# Altium footprint library FootPrintLib_10.PcbLib: 270 footprints (part 1 of 17)
Each footprint in its own frame and in the unit in brackets; x right, y up, seen from the top. Pads: shape width x height; smd on the part's side, far side on the other; paste and mask are expansions set on the pad; w line width, h text height; cw(c..) or ccw(c..) is an arc to the next point about the centre after c.
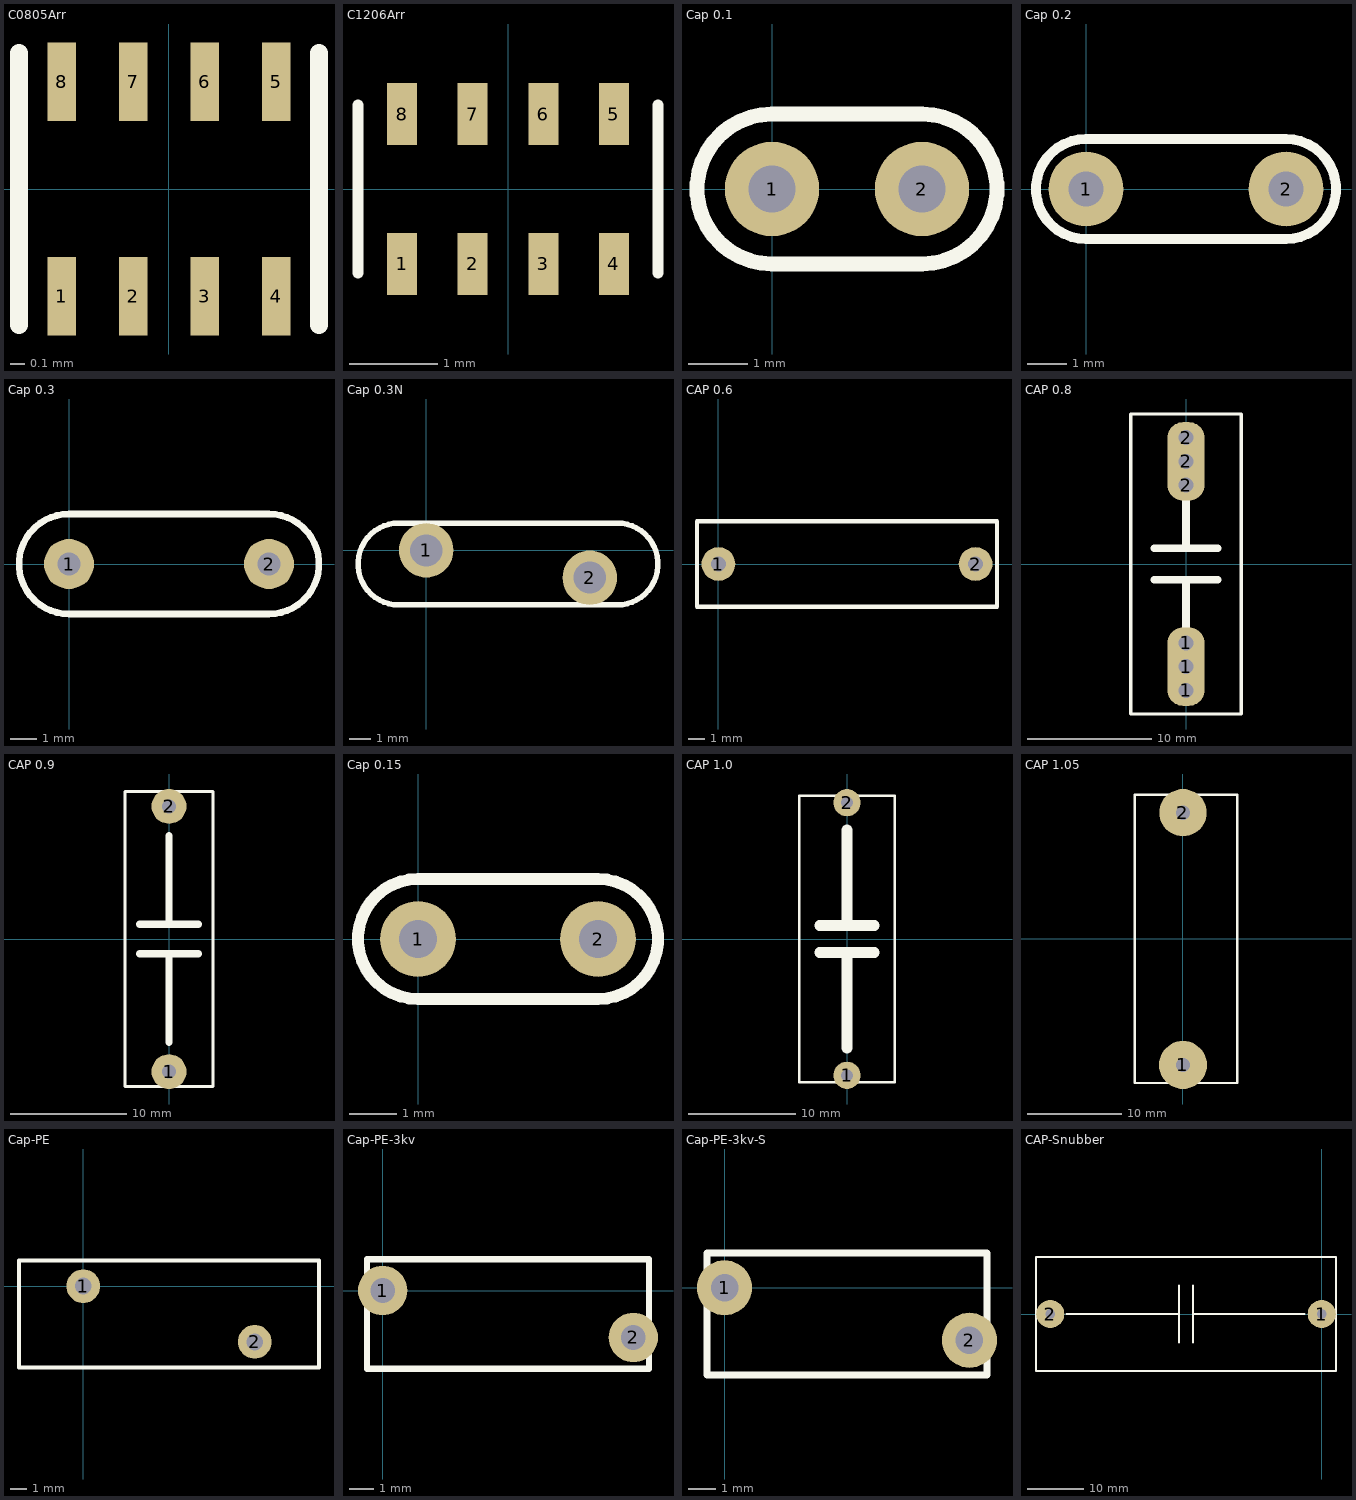
[diagram p0: the footprints below, top view; thin cyan lines are the x and y axes]

## C0805Arr [mm]
pads (8):
  rect 0.2x0.55 smd: 1(-0.75,-0.75) 2(-0.25,-0.75) 3(0.25,-0.75) 4(0.75,-0.75) 5(0.75,0.75) 6(0.25,0.75) 7(-0.25,0.75) 8(-0.75,0.75)
Top Overlay:
  lines w0.127: -1.05,-0.95 -1.05,0.95 ; 1.05,-0.95 1.05,0.95

## C1206Arr [mm]
pads (8):
  rect 0.34x0.7 smd: 1(-1.2,-0.85) 2(-0.4,-0.85) 3(0.4,-0.85) 4(1.2,-0.85) 5(1.2,0.85) 6(0.4,0.85) 7(-0.4,0.85) 8(-1.2,0.85)
Top Overlay:
  lines w0.127: -1.7,-0.95 -1.7,0.95 ; 1.7,-0.95 1.7,0.95

## Cap 0.1 [mm]
pads (2):
  round 1.6 hole 0.8: 1(0,0) 2(2.54,0)
Top Overlay:
  lines w0.254: 0,-1.27 cw(c0,0) 0,1.27 2.54,1.27 cw(c2.54,0) 2.54,-1.27 0,-1.27

## Cap 0.2 [mil]
pads (2):
  round 75 hole 35: 1(0,0) 2(200,0)
Top Overlay:
  lines w10: 0,-50 cw(c0,0) 0,50 200,50 cw(c200,0) 200,-50 0,-50

## Cap 0.3 [mil]
pads (2):
  round 75 hole 35: 1(0,0) 2(300,0)
Top Overlay:
  lines w10: 0,-75 cw(c0,0) 0,75 300,75 cw(c300,0) 300,-75 0,-75

## Cap 0.3N [mm]
pads (2):
  round 2.54 hole 1.5: 1(0,0) 2(7.62,-1.27)
Top Overlay:
  lines w0.254: -1.27,-2.54 cw(c-1.27,-0.635) -1.27,1.27 8.89,1.27 cw(c8.89,-0.635) 8.89,-2.54 -1.27,-2.54

## CAP 0.6 [mm]
pads (2):
  round 2 hole 0.9: 1(0,0) 2(15.24,0)
Top Overlay:
  lines w0.254: -1.27,-2.54 16.51,-2.54 16.51,2.54 -1.27,2.54 -1.27,-2.54

## CAP 0.8 [mm]
pads (6):
  oval 3x2.5 hole 1.2: 1(0,-10.16) 1(0,-6.35) 2(0,6.35) 2(0,10.16)
  rect 3x4 hole 1.2: 1(0,-8.255) 2(0,8.255)
Top Overlay:
  lines w0.254: -4.445,-12.065 -4.445,12.065 4.445,12.065 4.445,-12.065 -4.445,-12.065
  lines w0.635: -2.54,-1.27 2.54,-1.27 0,-1.27 0,-5.715 ; 0,5.715 0,1.27 -2.54,1.27 2.54,1.27

## CAP 0.9 [mm]
pads (2):
  round 3 hole 1.2: 1(0,-11.43) 2(0,11.43)
Top Overlay:
  lines w0.254: -3.81,-12.7 -3.81,12.7 3.81,12.7 3.81,-12.7 -3.81,-12.7
  lines w0.635: -2.54,-1.27 2.54,-1.27 0,-1.27 0,-8.89 ; 0,8.89 0,1.27 -2.54,1.27 2.54,1.27

## Cap 0.15 [mm]
pads (2):
  round 1.6 hole 0.8: 1(0,0) 2(3.81,0)
Top Overlay:
  lines w0.254: 0,-1.27 cw(c0,0) 0,1.27 3.81,1.27 cw(c3.81,0) 3.81,-1.27 0,-1.27

## CAP 1.0 [mm]
pads (2):
  round 2.54 hole 1.1: 1(0,-12.7) 2(0,12.7)
Top Overlay:
  lines w0.254: -4.445,-13.335 4.445,-13.335 4.445,13.335 -4.445,13.335 -4.445,-13.335
  lines w1.016: -2.54,-1.27 2.54,-1.27 ; -2.54,1.27 2.54,1.27 ; 0,-10.16 0,-1.27 ; 0,1.27 0,10.16

## CAP 1.05 [mm]
pads (2):
  round 5.08 hole 1.524: 1(0,-13.335)
  round 5 hole 1.524: 2(0,13.335)
Top Overlay:
  lines w0.254: -5.08,-15.24 -5.08,15.24 5.715,15.24 5.715,-15.24 -5.08,-15.24

## Cap-PE [mm]
pads (2):
  round 2 hole 1: 1(0,0) 2(10.16,-3.302)
Top Overlay:
  lines w0.254: -3.81,-4.826 13.97,-4.826 13.97,1.524 -3.81,1.524 -3.81,-4.826

## Cap-PE-3kv [mm]
pads (2):
  round 2 hole 1: 1(0,0) 2(10.16,-1.905)
Top Overlay:
  lines w0.254: -0.635,-3.175 -0.635,1.27 10.795,1.27 10.795,-3.175 -0.635,-3.175

## Cap-PE-3kv-S [mm]
pads (2):
  round 2 hole 1: 1(0,0) 2(8.89,-1.905)
Top Overlay:
  lines w0.254: -0.635,-3.175 -0.635,1.27 9.525,1.27 9.525,-3.175 -0.635,-3.175

## CAP-Snubber [mm]
pads (2):
  round 5 hole 1.75: 1(0,0) 2(-48.26,0)
Top Overlay:
  lines w0.381: -45.37,0 -25.4,0 ; -25.4,-5.08 -25.4,5.08 ; -22.86,-5.08 -22.86,5.08 ; -22.86,0 -3.06,0 ; -50.8,-10.16 -50.8,10.16 2.54,10.16 2.54,-10.16 -50.8,-10.16